# Altium footprint library Package_DFN_QFN.PcbLib: 735 footprints (part 3 of 46)
Each footprint in its own frame and in the unit in brackets; x right, y up, seen from the top. Pads: shape width x height; smd on the part's side, far side on the other; paste and mask are expansions set on the pad; w line width, h text height; cw(c..) or ccw(c..) is an arc to the next point about the centre after c.
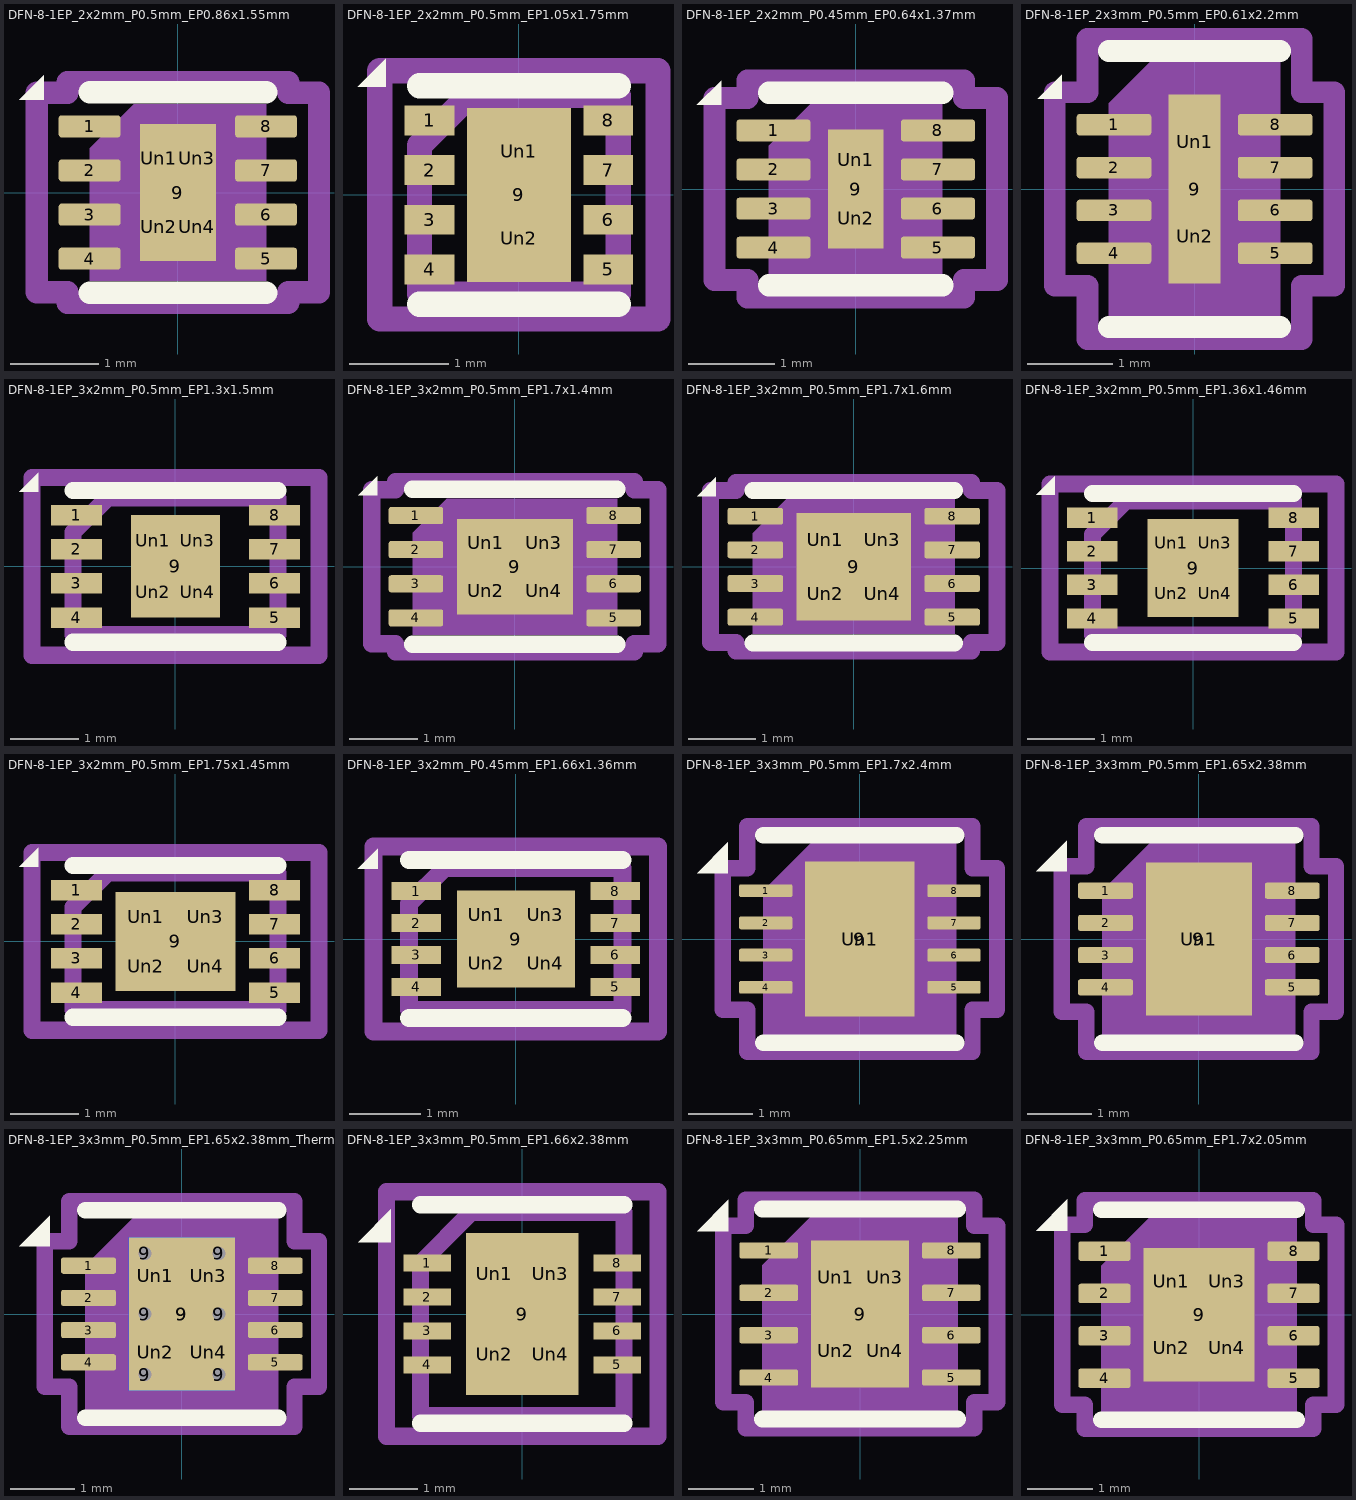
[diagram p2: the footprints below, top view; thin cyan lines are the x and y axes]

## DFN-8-1EP_2x2mm_P0.5mm_EP0.86x1.55mm [mm] "DFN-8-1EP_2x2mm_P0.5mm_EP0.86x1.55mm"
pads (13):
  rrect25% 0.7x0.25 smd: 1(-1,0.75) 2(-1,0.25) 3(-1,-0.25) 4(-1,-0.75) 5(1,-0.75) 6(1,-0.25) 7(1,0.25) 8(1,0.75)
  rect 0.86x1.55 smd: 9(0,0)
  rrect25% 0.35x0.62 on Top Paste: Un1(-0.215,0.39) Un2(-0.215,-0.39) Un3(0.215,0.39) Un4(0.215,-0.39)
F.SilkS:
  region: -1.52,1.05 -1.8,1.05 -1.52,1.33
  lines w0.254: -1,-1.135 1,-1.135 ; -1,1.135 1,1.135
Top Component Center:
  lines w0.127: -0.127,0 0.127,0 -0.127,0 ; 0,-0.127 0,0.127 0,-0.127
Top Assembly:
  region: 1,-1 -1,-1 -1,0.5 -0.5,1 1,1
Top Courtyard:
  lines w0.254: -1.6,-1.13 -1.6,1.13 -1.25,1.13 -1.25,1.25 1.25,1.25 1.25,1.13 1.6,1.13 1.6,-1.13 1.25,-1.13 1.25,-1.25 -1.25,-1.25 -1.25,-1.13 -1.6,-1.13
Top Designator:
  text ".Designator" at -2.251,-0.226 h1
3D body "DFN-8-1EP_2x2mm_P0.5mm_EP0.6x1.2mm.step": height 0.92, standoff 0, extent -1,-0.99 1,0.99

## DFN-8-1EP_2x2mm_P0.5mm_EP1.05x1.75mm [mm] "DFN-8-1EP_2x2mm_P0.5mm_EP1.05x1.75mm"
pads (11):
  rect 0.5x0.3 smd: 1(-0.9,0.75) 2(-0.9,0.25) 3(-0.9,-0.25) 4(-0.9,-0.75) 5(0.9,-0.75) 6(0.9,-0.25) 7(0.9,0.25) 8(0.9,0.75)
  rect 1.05x1.75 smd: 9(0,0)
  rect 0.85x0.65 on Top Paste: Un1(0,0.437) Un2(0,-0.437)
F.SilkS:
  region: -1.34,1.09 -1.62,1.09 -1.34,1.37
  lines w0.254: -1,-1.1 1,-1.1 ; -1,1.1 1,1.1
Top Component Center:
  lines w0.127: -0.127,0 0.127,0 -0.127,0 ; 0,-0.127 0,0.127 0,-0.127
Top Assembly:
  lines w0.254: -1,-1 1,-1 1,1 -0.5,1 -1,0.5 -1,-1
Top Courtyard:
  lines w0.254: -1.4,-1.25 1.4,-1.25 1.4,1.25 -1.4,1.25 -1.4,-1.25
Top Designator:
  text ".Designator" at -2.251,-0.226 h1
3D body "DFN-8-1EP_2x2mm_P0.5mm_EP1.05x1.75mm.step": height 0.92, standoff 0, extent -1,-0.99 1,0.99

## DFN-8-1EP_2x2mm_P0.45mm_EP0.64x1.37mm [mm] "DFN-8-1EP_2x2mm_P0.45mm_EP0.64x1.37mm"
pads (11):
  rrect25% 0.855x0.25 smd: 1(-0.947,0.675) 2(-0.947,0.225) 3(-0.947,-0.225) 4(-0.947,-0.675) 5(0.947,-0.675) 6(0.947,-0.225) 7(0.947,0.225) 8(0.947,0.675)
  rect 0.64x1.37 smd: 9(0,0)
  rrect25% 0.52x0.55 on Top Paste: Un1(0,0.34) Un2(0,-0.34)
F.SilkS:
  region: -1.55,0.97 -1.83,0.97 -1.55,1.25
  lines w0.254: -1,-1.11 1,-1.11 ; -1,1.11 1,1.11
Top Component Center:
  lines w0.127: -0.127,0 0.127,0 -0.127,0 ; 0,-0.127 0,0.127 0,-0.127
Top Assembly:
  region: 1,-1 -1,-1 -1,0.5 -0.5,1 1,1
Top Courtyard:
  lines w0.254: -1.63,-1.05 -1.25,-1.05 -1.25,-1.25 1.25,-1.25 1.25,-1.05 1.63,-1.05 1.63,1.05 1.25,1.05 1.25,1.25 -1.25,1.25 -1.25,1.05 -1.63,1.05 -1.63,-1.05
Top Designator:
  text ".Designator" at -2.251,-0.226 h1
3D body "DFN-8-1EP_2x2mm_P0.45mm_EP0.64x1.37mm.step": height 0.77, standoff 0, extent -1,-0.99 1,0.99

## DFN-8-1EP_2x3mm_P0.5mm_EP0.61x2.2mm [mm] "DFN-8-1EP_2x3mm_P0.5mm_EP0.61x2.2mm"
pads (11):
  rrect25% 0.87x0.25 smd: 1(-0.94,0.75) 2(-0.94,0.25) 3(-0.94,-0.25) 4(-0.94,-0.75) 5(0.94,-0.75) 6(0.94,-0.25) 7(0.94,0.25) 8(0.94,0.75)
  rect 0.61x2.2 smd: 9(0,0)
  rrect25% 0.49x0.89 on Top Paste: Un1(0,0.55) Un2(0,-0.55)
F.SilkS:
  region: -1.55,1.05 -1.83,1.05 -1.55,1.33
  lines w0.254: -1,-1.61 1,-1.61 ; -1,1.61 1,1.61
Top Component Center:
  lines w0.127: -0.127,0 0.127,0 -0.127,0 ; 0,-0.127 0,0.127 0,-0.127
Top Assembly:
  region: 1,-1.5 -1,-1.5 -1,1 -0.5,1.5 1,1.5
Top Courtyard:
  lines w0.254: -1.63,-1.13 -1.63,1.13 -1.25,1.13 -1.25,1.75 1.25,1.75 1.25,1.13 1.63,1.13 1.63,-1.13 1.25,-1.13 1.25,-1.75 -1.25,-1.75 -1.25,-1.13 -1.63,-1.13
Top Designator:
  text ".Designator" at -2.251,-0.226 h1
3D body "DFN-8-1EP_2x3mm_P0.5mm_EP0.61x2.2mm.step": height 0.77, standoff 0, extent -1,-1.49 1,1.49

## DFN-8-1EP_3x2mm_P0.5mm_EP1.3x1.5mm [mm] "DFN-8-1EP_3x2mm_P0.5mm_EP1.3x1.5mm"
pads (13):
  rect 0.75x0.3 smd: 1(-1.45,0.75) 2(-1.45,0.25) 3(-1.45,-0.25) 4(-1.45,-0.75) 5(1.45,-0.75) 6(1.45,-0.25) 7(1.45,0.25) 8(1.45,0.75)
  rect 1.3x1.5 smd: 9(0,0)
  rect 0.5x0.6 on Top Paste: Un1(-0.325,0.375) Un2(-0.325,-0.375) Un3(0.325,0.375) Un4(0.325,-0.375)
F.SilkS:
  region: -2.01,1.09 -2.29,1.09 -2.01,1.37
  lines w0.254: -1.5,-1.11 1.5,-1.11 ; -1.5,1.11 1.5,1.11
Top Component Center:
  lines w0.127: -0.127,0 0.127,0 -0.127,0 ; 0,-0.127 0,0.127 0,-0.127
Top Assembly:
  lines w0.254: -1.5,-1 -1.5,0.5 -1,1 1.5,1 1.5,-1 -1.5,-1
Top Courtyard:
  lines w0.254: -2.1,-1.3 -2.1,1.3 2.1,1.3 2.1,-1.3 -2.1,-1.3
Top Designator:
  text ".Designator" at -3.43,-0.344 h1.52
3D body "DFN-8-1EP_3x2mm_P0.5mm_EP1.75x1.45mm.step": height 0.77, standoff 0, extent -1.5,-0.99 1.5,0.99

## DFN-8-1EP_3x2mm_P0.5mm_EP1.7x1.4mm [mm] "DFN-8-1EP_3x2mm_P0.5mm_EP1.7x1.4mm"
pads (13):
  rrect25% 0.8x0.25 smd: 1(-1.45,0.75) 2(-1.45,0.25) 3(-1.45,-0.25) 4(-1.45,-0.75) 5(1.45,-0.75) 6(1.45,-0.25) 7(1.45,0.25) 8(1.45,0.75)
  rect 1.7x1.4 smd: 9(0,0)
  rrect25% 0.69x0.56 on Top Paste: Un1(-0.425,0.35) Un2(-0.425,-0.35) Un3(0.425,0.35) Un4(0.425,-0.35)
F.SilkS:
  region: -2.02,1.05 -2.3,1.05 -2.02,1.33
  lines w0.254: -1.5,-1.135 1.5,-1.135 ; -1.5,1.135 1.5,1.135
Top Component Center:
  lines w0.127: -0.127,0 0.127,0 -0.127,0 ; 0,-0.127 0,0.127 0,-0.127
Top Assembly:
  region: 1.5,-1 -1.5,-1 -1.5,0.5 -1,1 1.5,1
Top Courtyard:
  lines w0.254: -2.1,-1.13 -2.1,1.13 -1.75,1.13 -1.75,1.25 1.75,1.25 1.75,1.13 2.1,1.13 2.1,-1.13 1.75,-1.13 1.75,-1.25 -1.75,-1.25 -1.75,-1.13 -2.1,-1.13
Top Designator:
  text ".Designator" at -3.43,-0.344 h1.52
3D body "DFN-8-1EP_3x2mm_P0.5mm_EP1.7x1.6mm.step": height 0.92, standoff 0, extent -1.5,-0.988 1.5,0.988

## DFN-8-1EP_3x2mm_P0.5mm_EP1.7x1.6mm [mm] "DFN-8-1EP_3x2mm_P0.5mm_EP1.7x1.6mm"
pads (13):
  rrect25% 0.825x0.25 smd: 1(-1.462,0.75) 2(-1.462,0.25) 3(-1.462,-0.25) 4(-1.462,-0.75) 5(1.462,-0.75) 6(1.462,-0.25) 7(1.462,0.25) 8(1.462,0.75)
  rect 1.7x1.6 smd: 9(0,0)
  rrect25% 0.69x0.64 on Top Paste: Un1(-0.425,0.4) Un2(-0.425,-0.4) Un3(0.425,0.4) Un4(0.425,-0.4)
F.SilkS:
  region: -2.05,1.05 -2.33,1.05 -2.05,1.33
  lines w0.254: -1.5,-1.135 1.5,-1.135 ; -1.5,1.135 1.5,1.135
Top Component Center:
  lines w0.127: -0.127,0 0.127,0 -0.127,0 ; 0,-0.127 0,0.127 0,-0.127
Top Assembly:
  region: 1.5,-1 -1.5,-1 -1.5,0.5 -1,1 1.5,1
Top Courtyard:
  lines w0.254: -2.13,-1.13 -2.13,1.13 -1.75,1.13 -1.75,1.25 1.75,1.25 1.75,1.13 2.13,1.13 2.13,-1.13 1.75,-1.13 1.75,-1.25 -1.75,-1.25 -1.75,-1.13 -2.13,-1.13
Top Designator:
  text ".Designator" at -3.43,-0.344 h1.52
3D body "DFN-8-1EP_3x2mm_P0.5mm_EP1.7x1.6mm.step": height 0.92, standoff 0, extent -1.5,-0.988 1.5,0.988

## DFN-8-1EP_3x2mm_P0.5mm_EP1.36x1.46mm [mm] "DFN-8-1EP_3x2mm_P0.5mm_EP1.36x1.46mm"
pads (13):
  rect 0.75x0.3 smd: 1(-1.5,0.75) 2(-1.5,0.25) 3(-1.5,-0.25) 4(-1.5,-0.75) 5(1.5,-0.75) 6(1.5,-0.25) 7(1.5,0.25) 8(1.5,0.75)
  rect 1.36x1.46 smd: 9(0,0)
  rect 0.5x0.6 on Top Paste: Un1(-0.325,0.375) Un2(-0.325,-0.375) Un3(0.325,0.375) Un4(0.325,-0.375)
F.SilkS:
  region: -2.06,1.09 -2.34,1.09 -2.06,1.37
  lines w0.254: -1.5,-1.11 1.5,-1.11 ; -1.5,1.11 1.5,1.11
Top Component Center:
  lines w0.127: -0.127,0 0.127,0 -0.127,0 ; 0,-0.127 0,0.127 0,-0.127
Top Assembly:
  lines w0.254: -1.5,-1 -1.5,0.5 -1,1 1.5,1 1.5,-1 -1.5,-1
Top Courtyard:
  lines w0.254: -2.13,-1.25 -2.13,1.25 2.13,1.25 2.13,-1.25 -2.13,-1.25
Top Designator:
  text ".Designator" at -3.43,-0.344 h1.52
3D body "DFN-8-1EP_3x2mm_P0.5mm_EP1.75x1.45mm.step": height 0.77, standoff 0, extent -1.5,-0.99 1.5,0.99

## DFN-8-1EP_3x2mm_P0.5mm_EP1.75x1.45mm [mm] "DFN-8-1EP_3x2mm_P0.5mm_EP1.75x1.45mm"
pads (13):
  rect 0.75x0.3 smd: 1(-1.45,0.75) 2(-1.45,0.25) 3(-1.45,-0.25) 4(-1.45,-0.75) 5(1.45,-0.75) 6(1.45,-0.25) 7(1.45,0.25) 8(1.45,0.75)
  rect 1.75x1.45 smd: 9(0,0)
  rect 0.71x0.58 on Top Paste: Un1(-0.437,0.363) Un2(-0.437,-0.363) Un3(0.437,0.363) Un4(0.437,-0.363)
F.SilkS:
  region: -2.01,1.09 -2.29,1.09 -2.01,1.37
  lines w0.254: -1.5,-1.11 1.5,-1.11 ; -1.5,1.11 1.5,1.11
Top Component Center:
  lines w0.127: -0.127,0 0.127,0 -0.127,0 ; 0,-0.127 0,0.127 0,-0.127
Top Assembly:
  lines w0.254: -1.5,-1 1.5,-1 1.5,1 -1,1 -1.5,0.5 -1.5,-1
Top Courtyard:
  lines w0.254: -2.1,-1.3 2.1,-1.3 2.1,1.3 -2.1,1.3 -2.1,-1.3
Top Designator:
  text ".Designator" at -3.43,-0.344 h1.52
3D body "DFN-8-1EP_3x2mm_P0.5mm_EP1.75x1.45mm.step": height 0.77, standoff 0, extent -1.5,-0.99 1.5,0.99

## DFN-8-1EP_3x2mm_P0.45mm_EP1.66x1.36mm [mm] "DFN-8-1EP_3x2mm_P0.45mm_EP1.66x1.36mm"
pads (13):
  rect 0.7x0.25 smd: 1(-1.4,0.675) 2(-1.4,0.225) 3(-1.4,-0.225) 4(-1.4,-0.675) 5(1.4,-0.675) 6(1.4,-0.225) 7(1.4,0.225) 8(1.4,0.675)
  rect 1.66x1.36 smd: 9(0,0)
  rect 0.66x0.55 on Top Paste: Un1(-0.415,0.34) Un2(-0.415,-0.34) Un3(0.415,0.34) Un4(0.415,-0.34)
F.SilkS:
  region: -1.94,0.99 -2.22,0.99 -1.94,1.27
  lines w0.254: -1.5,-1.11 1.5,-1.11 ; -1.5,1.11 1.5,1.11
Top Component Center:
  lines w0.127: -0.127,0 0.127,0 -0.127,0 ; 0,-0.127 0,0.127 0,-0.127
Top Assembly:
  lines w0.254: -1.5,-1 1.5,-1 1.5,1 -1,1 -1.5,0.5 -1.5,-1
Top Courtyard:
  lines w0.254: -2,-1.3 2,-1.3 2,1.3 -2,1.3 -2,-1.3
Top Designator:
  text ".Designator" at -3.43,-0.344 h1.52
3D body "DFN-8-1EP_3x2mm_P0.45mm_EP1.66x1.36mm.step": height 0.77, standoff 0, extent -1.5,-0.99 1.5,0.99

## DFN-8-1EP_3x3mm_P0.5mm_EP1.7x2.4mm [mm] "DFN-8-1EP_3x3mm_P0.5mm_EP1.7x2.4mm"
pads (10):
  rrect25% 0.825x0.2 smd: 1(-1.462,0.75) 2(-1.462,0.25) 3(-1.462,-0.25) 4(-1.462,-0.75) 5(1.462,-0.75) 6(1.462,-0.25) 7(1.462,0.25) 8(1.462,0.75)
  rect 1.7x2.4 smd: 9(0,0)
  rrect18% 1.37x1.93 on Top Paste: Un1(0,0)
F.SilkS:
  region: -2.05,1.02 -2.53,1.02 -2.05,1.5
  lines w0.254: -1.5,-1.61 1.5,-1.61 ; -1.5,1.61 1.5,1.61
Top Component Center:
  lines w0.127: -0.127,0 0.127,0 -0.127,0 ; 0,-0.127 0,0.127 0,-0.127
Top Assembly:
  region: 1.5,-1.5 -1.5,-1.5 -1.5,0.75 -0.75,1.5 1.5,1.5
Top Courtyard:
  lines w0.254: -2.13,-1.1 -2.13,1.1 -1.75,1.1 -1.75,1.75 1.75,1.75 1.75,1.1 2.13,1.1 2.13,-1.1 1.75,-1.1 1.75,-1.75 -1.75,-1.75 -1.75,-1.1 -2.13,-1.1
Top Designator:
  text ".Designator" at -3.43,-0.344 h1.52
3D body "DFN-8-1EP_3x3mm_P0.5mm_EP1.66x2.38mm.step": height 0.77, standoff 0, extent -1.5,-1.49 1.5,1.49

## DFN-8-1EP_3x3mm_P0.5mm_EP1.65x2.38mm [mm] "DFN-8-1EP_3x3mm_P0.5mm_EP1.65x2.38mm"
pads (10):
  rrect25% 0.85x0.25 smd: 1(-1.45,0.75) 2(-1.45,0.25) 3(-1.45,-0.25) 4(-1.45,-0.75) 5(1.45,-0.75) 6(1.45,-0.25) 7(1.45,0.25) 8(1.45,0.75)
  rect 1.65x2.38 smd: 9(0,0)
  rrect19% 1.33x1.92 on Top Paste: Un1(0,0)
F.SilkS:
  region: -2.05,1.05 -2.53,1.05 -2.05,1.53
  lines w0.254: -1.5,-1.61 1.5,-1.61 ; -1.5,1.61 1.5,1.61
Top Component Center:
  lines w0.127: -0.127,0 0.127,0 -0.127,0 ; 0,-0.127 0,0.127 0,-0.127
Top Assembly:
  region: 1.5,-1.5 -1.5,-1.5 -1.5,0.75 -0.75,1.5 1.5,1.5
Top Courtyard:
  lines w0.254: -2.13,-1.13 -1.75,-1.13 -1.75,-1.75 1.75,-1.75 1.75,-1.13 2.13,-1.13 2.13,1.13 1.75,1.13 1.75,1.75 -1.75,1.75 -1.75,1.13 -2.13,1.13 -2.13,-1.13
Top Designator:
  text ".Designator" at -3.43,-0.344 h1.52
3D body "DFN-8-1EP_3x3mm_P0.5mm_EP1.66x2.38mm.step": height 0.77, standoff 0, extent -1.5,-1.49 1.5,1.49

## DFN-8-1EP_3x3mm_P0.5mm_EP1.65x2.38mm_ThermalVias [mm] "DFN-8-1EP_3x3mm_P0.5mm_EP1.65x2.38mm_ThermalVias"
pads (20):
  rrect25% 0.85x0.25 smd: 1(-1.45,0.75) 2(-1.45,0.25) 3(-1.45,-0.25) 4(-1.45,-0.75) 5(1.45,-0.75) 6(1.45,-0.25) 7(1.45,0.25) 8(1.45,0.75)
  round 0.5 hole 0.2: 9(-0.575,-0.94) 9(-0.575,0) 9(-0.575,0.94) 9(0.575,-0.94) 9(0.575,0) 9(0.575,0.94)
  rect 1.65x2.38 smd: 9(0,0)
  rect 1.65x2.38 smd far side: 9(0,0)
  rrect25% 0.67x0.96 on Top Paste: Un1(-0.41,0.595) Un2(-0.41,-0.595) Un3(0.41,0.595) Un4(0.41,-0.595)
F.SilkS:
  region: -2.05,1.05 -2.53,1.05 -2.05,1.53
  lines w0.254: -1.5,-1.61 1.5,-1.61 ; -1.5,1.61 1.5,1.61
Top Component Center:
  lines w0.127: -0.127,0 0.127,0 -0.127,0 ; 0,-0.127 0,0.127 0,-0.127
Top Assembly:
  region: 1.5,-1.5 -1.5,-1.5 -1.5,0.75 -0.75,1.5 1.5,1.5
Top Courtyard:
  lines w0.254: -2.13,-1.13 -1.75,-1.13 -1.75,-1.75 1.75,-1.75 1.75,-1.13 2.13,-1.13 2.13,1.13 1.75,1.13 1.75,1.75 -1.75,1.75 -1.75,1.13 -2.13,1.13 -2.13,-1.13
Top Designator:
  text ".Designator" at -3.54,-0.344 h1.52
3D body "DFN-8-1EP_3x3mm_P0.5mm_EP1.66x2.38mm.step": height 0.77, standoff 0, extent -1.5,-1.49 1.5,1.49

## DFN-8-1EP_3x3mm_P0.5mm_EP1.66x2.38mm [mm] "DFN-8-1EP_3x3mm_P0.5mm_EP1.66x2.38mm"
pads (13):
  rect 0.7x0.25 smd: 1(-1.4,0.75) 2(-1.4,0.25) 3(-1.4,-0.25) 4(-1.4,-0.75) 5(1.4,-0.75) 6(1.4,-0.25) 7(1.4,0.25) 8(1.4,0.75)
  rect 1.66x2.38 smd: 9(0,0)
  rect 0.64x1 on Top Paste: Un1(-0.415,0.595) Un2(-0.415,-0.595) Un3(0.415,0.595) Un4(0.415,-0.595)
F.SilkS:
  region: -1.94,1.06 -2.42,1.06 -1.94,1.54
  lines w0.254: -1.5,-1.61 1.5,-1.61 ; -1.5,1.61 1.5,1.61
Top Component Center:
  lines w0.127: -0.127,0 0.127,0 -0.127,0 ; 0,-0.127 0,0.127 0,-0.127
Top Assembly:
  lines w0.254: -1.5,-1.5 -1.5,0.75 -0.75,1.5 1.5,1.5 1.5,-1.5 -1.5,-1.5
Top Courtyard:
  lines w0.254: -2,-1.8 -2,1.8 2,1.8 2,-1.8 -2,-1.8
Top Designator:
  text ".Designator" at -2.251,-0.226 h1
3D body "DFN-8-1EP_3x3mm_P0.5mm_EP1.66x2.38mm.step": height 0.77, standoff 0, extent -1.5,-1.49 1.5,1.49

## DFN-8-1EP_3x3mm_P0.65mm_EP1.5x2.25mm [mm] "DFN-8-1EP_3x3mm_P0.65mm_EP1.5x2.25mm"
pads (13):
  rrect25% 0.9x0.25 smd: 1(-1.4,0.975) 2(-1.4,0.325) 3(-1.4,-0.325) 4(-1.4,-0.975) 5(1.4,-0.975) 6(1.4,-0.325) 7(1.4,0.325) 8(1.4,0.975)
  rect 1.5x2.25 smd: 9(0,0)
  rrect25% 0.6x0.91 on Top Paste: Un1(-0.375,0.56) Un2(-0.375,-0.56) Un3(0.375,0.56) Un4(0.375,-0.56)
F.SilkS:
  region: -2.02,1.27 -2.5,1.27 -2.02,1.75
  lines w0.254: -1.5,-1.61 1.5,-1.61 ; -1.5,1.61 1.5,1.61
Top Component Center:
  lines w0.127: -0.127,0 0.127,0 -0.127,0 ; 0,-0.127 0,0.127 0,-0.127
Top Assembly:
  region: 1.5,-1.5 -1.5,-1.5 -1.5,0.75 -0.75,1.5 1.5,1.5
Top Courtyard:
  lines w0.254: -2.1,-1.35 -2.1,1.35 -1.75,1.35 -1.75,1.75 1.75,1.75 1.75,1.35 2.1,1.35 2.1,-1.35 1.75,-1.35 1.75,-1.75 -1.75,-1.75 -1.75,-1.35 -2.1,-1.35
Top Designator:
  text ".Designator" at -3.43,-0.344 h1.52
3D body "DFN-8-1EP_3x3mm_P0.65mm_EP1.5x2.25mm.step": height 0.6, standoff 0, extent -1.5,-1.49 1.5,1.49

## DFN-8-1EP_3x3mm_P0.65mm_EP1.7x2.05mm [mm] "DFN-8-1EP_3x3mm_P0.65mm_EP1.7x2.05mm"
pads (13):
  rrect25% 0.8x0.3 smd: 1(-1.45,0.975) 2(-1.45,0.325) 3(-1.45,-0.325) 4(-1.45,-0.975) 5(1.45,-0.975) 6(1.45,-0.325) 7(1.45,0.325) 8(1.45,0.975)
  rect 1.7x2.05 smd: 9(0,0)
  rrect25% 0.69x0.83 on Top Paste: Un1(-0.425,0.51) Un2(-0.425,-0.51) Un3(0.425,0.51) Un4(0.425,-0.51)
F.SilkS:
  region: -2.02,1.29 -2.5,1.29 -2.02,1.77
  lines w0.254: -1.5,-1.61 1.5,-1.61 ; -1.5,1.61 1.5,1.61
Top Component Center:
  lines w0.127: -0.127,0 0.127,0 -0.127,0 ; 0,-0.127 0,0.127 0,-0.127
Top Assembly:
  region: 1.5,-1.5 -1.5,-1.5 -1.5,0.75 -0.75,1.5 1.5,1.5
Top Courtyard:
  lines w0.254: -2.1,-1.38 -1.75,-1.38 -1.75,-1.75 1.75,-1.75 1.75,-1.38 2.1,-1.38 2.1,1.38 1.75,1.38 1.75,1.75 -1.75,1.75 -1.75,1.38 -2.1,1.38 -2.1,-1.38
Top Designator:
  text ".Designator" at -3.43,-0.344 h1.52
3D body "DFN-8-1EP_3x3mm_P0.65mm_EP1.55x2.4mm.step": height 0.77, standoff 0, extent -1.5,-1.49 1.5,1.49